# Altium schematic symbol library 2020-05-17_11-05-21.SchLib: 2 symbols
Pins are listed as number, name and electrical type; pins without a type are passive.

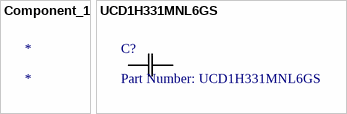
[diagram p0: symbols Component_1 to UCD1H331MNL6GS]

## Component_1
designator *

## UCD1H331MNL6GS
designator C?, comment Part Number: UCD1H331MNL6GS
No Description Available; Vendor: Nichicon; Built_By: EMA_Cory; SourceLibrary: Nichicon_2019-09-13; Type: DEV; Manufacturer_Part_Number: UCD1H331MNL6GS; Copyright: Copyright (C) 2018 Accelerated Designs. All rights reserved; RefDes: RefDes; Value: Value
footprint CAP_UCD_10X13P5_
pins: 1, 2